# Altium schematic symbol library Connectors.SchLib: 10 symbols
Pins are listed as number, name and electrical type; pins without a type are passive.

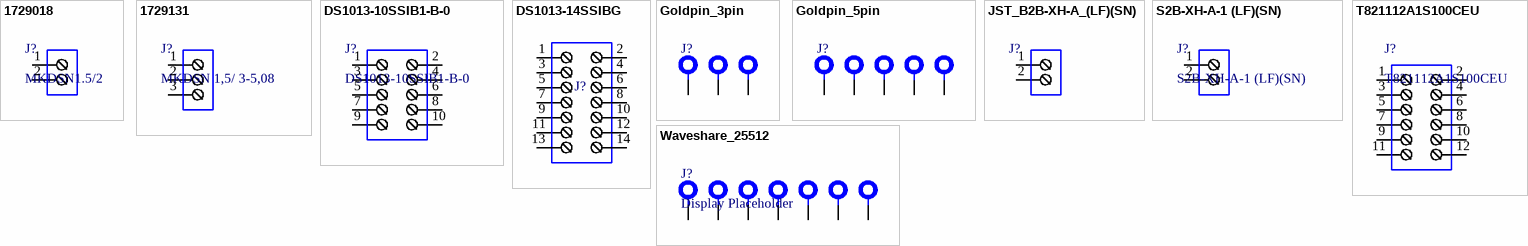
[diagram p0: symbols 1729018 to Waveshare_25512]

## 1729018
designator J?, comment MKDSN1.5/2
Connector: PCB terminal block; 17.5A; 400V; PIN: 2; screw terminal
footprint 1729018 (Connector: PCB terminal block; 17.5A; 400V; PIN: 2; screw terminal)
pins: 1, 2

## 1729131
designator J?, comment MKDSN 1,5/ 3-5,08
Connector: PCB terminal block; 17.5A; 400V; PIN: 3; screw terminal
footprint 1729131 (Connector: PCB terminal block; 17.5A; 400V; PIN: 3; screw terminal)
pins: 1, 2, 3

## DS1013-10SSIB1-B-0
designator J?
Connector: IDC; socket; male; PIN: 10; straight; THT; 2.54mm; 2x5
footprint DS1013-10SSIB1-B-0 (Connector: IDC; socket; male; PIN: 10; straight; THT; 2.54mm; 2x5)
pins: 1, 2, 3, 4, 5, 6, 7, 8, 9, 10

## DS1013-14SSIBG
designator J?
Connector: IDC; socket; male; data; PIN: 14; straight; THT; 2.54mm
footprint DS1013-14SSIBG (Connector: IDC; socket; male; data; PIN: 14; straight; THT; 2.54mm)
pins: 1, 2, 3, 4, 5, 6, 7, 8, 9, 10, 11, 12, 13, 14

## Goldpin_3pin
designator J?
goldpin 3 pin connector
footprint Goldpin_3pin
pins: 1, 2, 3

## Goldpin_5pin
designator J?
Goldpin 5pin connector
footprint Goldpin_5pin
pins: 1, 2, 3, 4, 5

## JST_B2B-XH-A_(LF)(SN)
designator J?
Connector: wire-board; XH; socket; male; data; 3A; 250V; PIN: 2; 2.5mm
footprint JST_B2B-XH-A_(LF)(SN) (Connector: wire-board; XH; socket; male; data; 3A; 250V; PIN: 2; 2.5mm)
pins: 1, 2

## S2B-XH-A-1 (LF)(SN)
designator J?
Connector: wire-board; socket; male; PIN: 2; XH; 3A; 250V; angled 90°
footprint S2B-XH-A-1 (LF)(SN) (Connector: wire-board; socket; male; PIN: 2; XH; 3A; 250V; angled 90°)
pins: 1, 2

## T821112A1S100CEU
designator J?
Connector: IDC; socket; male; PIN: 12; straight; THT; 2.54mm; 2x6
footprint T821112A1S100CEU (Connector: IDC; socket; male; PIN: 12; straight; THT; 2.54mm; 2x6)
pins: 1, 2, 3, 4, 5, 6, 7, 8, 9, 10, 11, 12

## Waveshare_25512
designator J?, comment Display Placeholder
Waveshare 25512 128x64 OLED display placeholder
footprint Waveshare_25512 (Waveshare 25512 placeholder)
pins: 1 RST, 2 DC, 3 CS, 4 CLK, 5 DIN, 6 GND, 7 VCC